# Altium footprint library CB3S.PcbLib: 1 footprints
Each footprint in its own frame and in the unit in brackets; x right, y up, seen from the top. Pads: shape width x height; smd on the part's side, far side on the other; paste and mask are expansions set on the pad; w line width, h text height; cw(c..) or ccw(c..) is an arc to the next point about the centre after c.
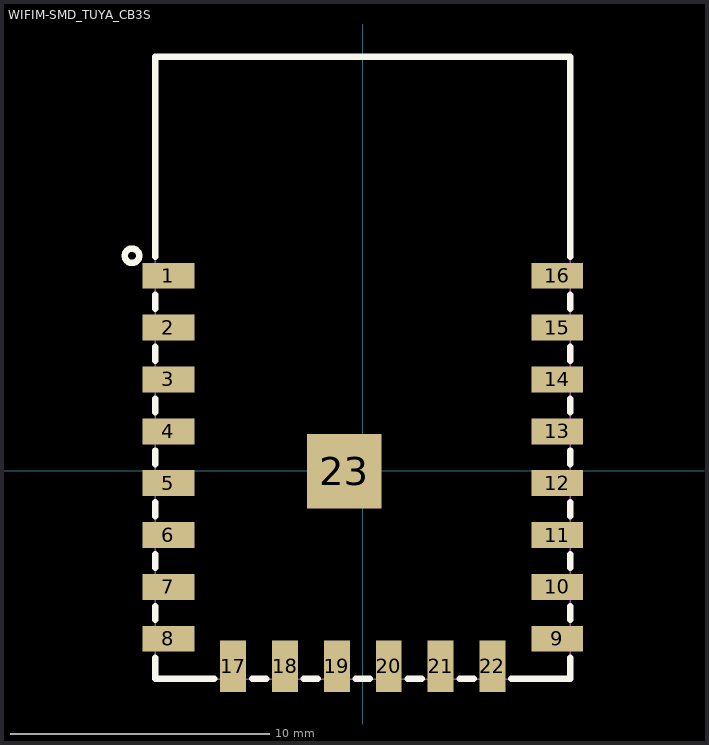
[diagram p0: the footprint, top view; thin cyan lines are the x and y axes]

## WIFIM-SMD_TUYA_CB3S [mm] "Tuya CB3S(qh6) 16x24 mm, LCSC C2844245 (EasyEDA official footprint)"
height 3.3
pads (23):
  rect 2x1 smd: 1(-7.5,7.53) 2(-7.5,5.53) 3(-7.5,3.53) 4(-7.5,1.53) 5(-7.5,-0.47) 6(-7.5,-2.47) 7(-7.5,-4.47) 8(-7.5,-6.47) 9(7.5,-6.47) 10(7.5,-4.47) 11(7.5,-2.47) 12(7.5,-0.47) 13(7.5,1.53) 14(7.5,3.53) 15(7.5,5.53) 16(7.5,7.53)
  rect 1x2 smd: 17(-5,-7.53) 18(-3,-7.53) 19(-1,-7.53) 20(1,-7.53) 21(3,-7.53) 22(5,-7.53)
  rect 2.87x2.87 smd: 23(-0.72,-0.01)
Top Overlay:
  circle w0.06: c-8,15.98 r0.03
  circle w0.25: c-8.9,8.3 r0.28
  lines w0.25: -8,-7.21 -8,-8.02 -5.73,-8.02 ; -8,-5.74 -8,-5.21 ; -8,-3.74 -8,-3.21 ; -8,-1.74 -8,-1.21 ; -8,0.26 -8,0.79 ; -8,2.26 -8,2.79 ; -8,4.26 -8,4.79 ; -8,6.26 -8,6.79 ; -8,8.26 -8,15.98 8,15.98 8,8.26 ; -4.27,-8.02 -3.73,-8.02 ; -2.27,-8.02 -1.73,-8.02 ; -0.27,-8.02 0.27,-8.02 ; 1.73,-8.02 2.27,-8.02 ; 3.73,-8.02 4.27,-8.02 ; 5.73,-8.02 8,-8.02 8,-7.21 ; 8,-5.74 8,-5.21 ; 8,-3.74 8,-3.21 ; 8,-1.74 8,-1.21 ; 8,0.26 8,0.79 ; 8,2.26 8,2.79 ; 8,4.26 8,4.79 ; 8,6.26 8,6.79
Mechanical 15:
  lines w0.05: -8,-8.03 -8,15.97 8,15.97 8,-8.03 -8,-8.03